# Altium integrated library GRM216R71H103KA01D.IntLib: 1 symbol
Pins are listed as number, name and electrical type; pins without a type are passive.

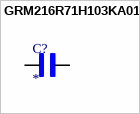
[diagram p0: symbol GRM216R71H103KA01D]

## GRM216R71H103KA01D
designator C?
SMD Capacitor X7R(EIA) with Capacitance: 10000pF Tol. 10%. Rated Voltage: 50Vdc; MF: Murata; MP: GRM216R71H103KA01D; SnapEDA_Link: https://www.snapeda.com/parts/GRM216R71H103KA01D/Murata/view-part/?ref=snap; Package: 2012 Murata; Value: *; Check_prices: https://www.snapeda.com/parts/GRM216R71H103KA01D/Murata/view-part/?ref=eda
footprint CAPC2012X70N
pins: 1, 2